# Altium schematic symbol library WR-TBL_Pluggable Connector.SchLib: 879 symbols (part 4 of 15)
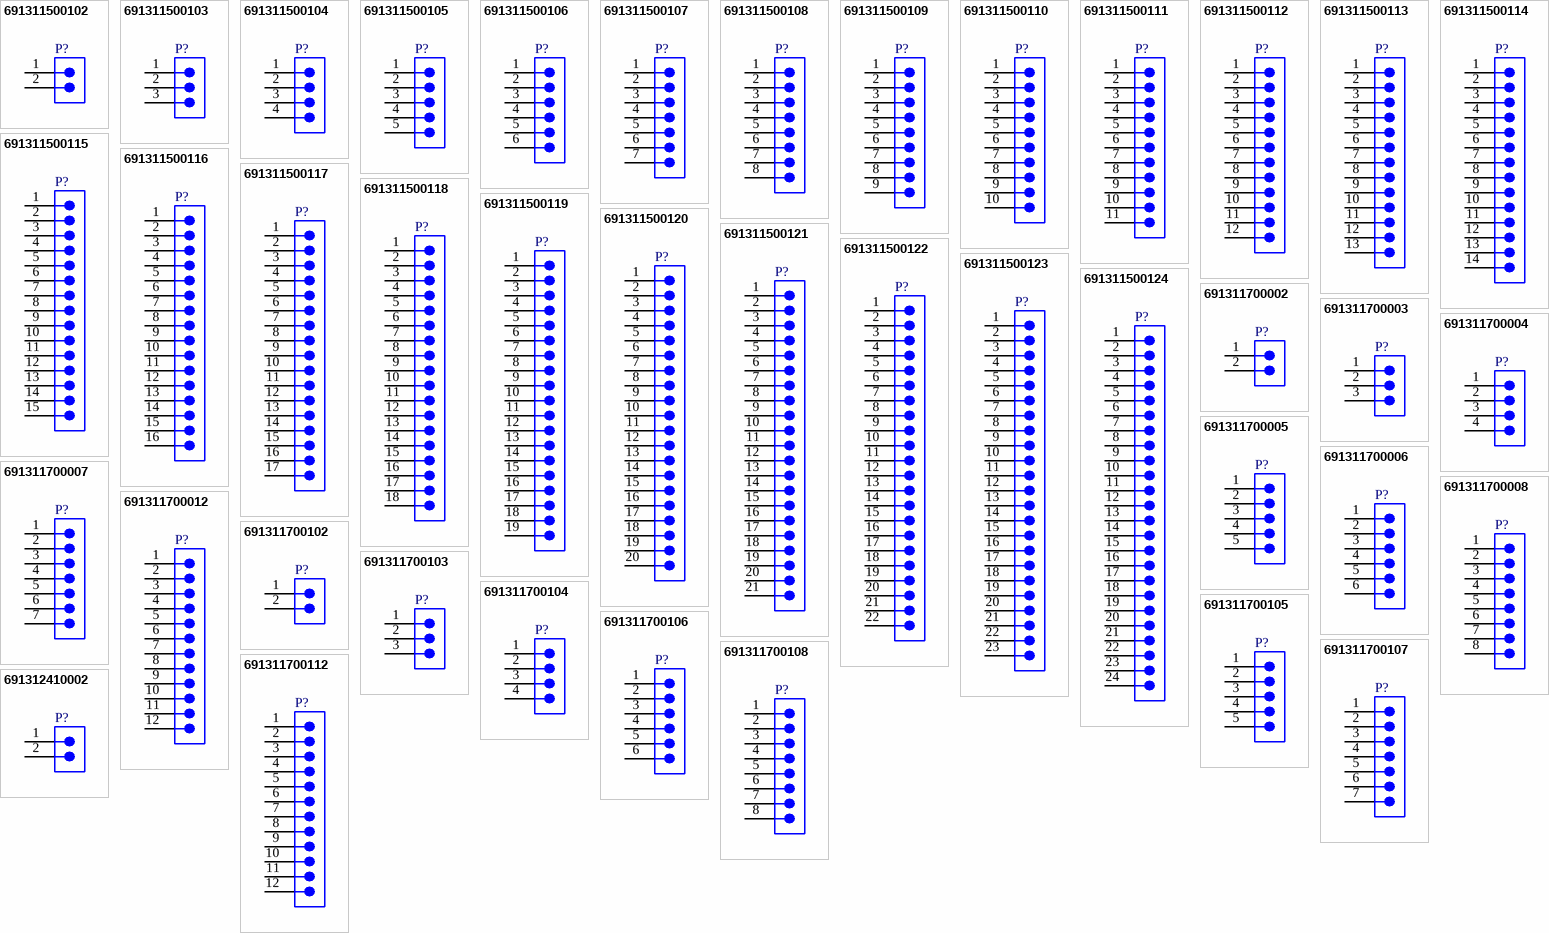
[diagram p24: symbols 691311500102 to 691312410002]

## 691311700103
designator P?  (value not drawn)
WR-TBL Series 3117 Close Vertical PCB Header, THT, pitch 5mm, 03p; Manufacturer: Wurth Elektronik; Modularity: No; Rated Current: 15A; Working Voltage: 300V (AC); Manufacturer Part Number: 691311700103; Product Series: WR-TBL; ComponentLink1Description: Website Link; ComponentLink1URL: https://www.we-online.com; ComponentLink2Description: Datasheet Link; ComponentLink2URL: https://www.we-online.com/components/products/datasheet/691311700103; Mount: Through Hole; Operating Temperature Min: -40degC; Operating Temperature Max: 105degC; Packaging: Box; Application: Pluggable; Number of Pins: 3; Number of Rows: 1; Orientation: Vertical; Lead Pitch: 5mm
footprint 691311700103
pins: 1, 2, 3

## 691311700104
designator P?  (value not drawn)
WR-TBL Series 3117 Close Vertical PCB Header, THT, pitch 5mm, 04p; Manufacturer: Wurth Elektronik; Modularity: No; Rated Current: 15A; Working Voltage: 300V (AC); Manufacturer Part Number: 691311700104; Product Series: WR-TBL; ComponentLink1Description: Website Link; ComponentLink1URL: https://www.we-online.com; ComponentLink2Description: Datasheet Link; ComponentLink2URL: https://www.we-online.com/components/products/datasheet/691311700104; Mount: Through Hole; Operating Temperature Min: -40degC; Operating Temperature Max: 105degC; Packaging: Box; Application: Pluggable; Number of Pins: 4; Number of Rows: 1; Orientation: Vertical; Lead Pitch: 5mm
footprint 691311700104
pins: 1, 2, 3, 4

## 691311700105
designator P?  (value not drawn)
WR-TBL Series 3117 Close Vertical PCB Header, THT, pitch 5mm, 05p; Manufacturer: Wurth Elektronik; Modularity: No; Rated Current: 15A; Working Voltage: 300V (AC); Manufacturer Part Number: 691311700105; Product Series: WR-TBL; ComponentLink1Description: Website Link; ComponentLink1URL: https://www.we-online.com; ComponentLink2Description: Datasheet Link; ComponentLink2URL: https://www.we-online.com/components/products/datasheet/691311700105; Mount: Through Hole; Operating Temperature Min: -40degC; Operating Temperature Max: 105degC; Packaging: Box; Application: Pluggable; Number of Pins: 5; Number of Rows: 1; Orientation: Vertical; Lead Pitch: 5mm
footprint 691311700105
pins: 1, 2, 3, 4, 5

## 691311700106
designator P?  (value not drawn)
WR-TBL Series 3117 Close Vertical PCB Header, THT, pitch 5mm, 06p; Manufacturer: Wurth Elektronik; Modularity: No; Rated Current: 15A; Working Voltage: 300V (AC); Manufacturer Part Number: 691311700106; Product Series: WR-TBL; ComponentLink1Description: Website Link; ComponentLink1URL: https://www.we-online.com; ComponentLink2Description: Datasheet Link; ComponentLink2URL: https://www.we-online.com/components/products/datasheet/691311700106; Mount: Through Hole; Operating Temperature Min: -40degC; Operating Temperature Max: 105degC; Packaging: Box; Application: Pluggable; Number of Pins: 6; Number of Rows: 1; Orientation: Vertical; Lead Pitch: 5mm
footprint 691311700106
pins: 1, 2, 3, 4, 5, 6

## 691311700107
designator P?  (value not drawn)
WR-TBL Series 3117 Close Vertical PCB Header, THT, pitch 5mm, 07p; Manufacturer: Wurth Elektronik; Modularity: No; Rated Current: 15A; Working Voltage: 300V (AC); Manufacturer Part Number: 691311700107; Product Series: WR-TBL; ComponentLink1Description: Website Link; ComponentLink1URL: https://www.we-online.com; ComponentLink2Description: Datasheet Link; ComponentLink2URL: https://www.we-online.com/components/products/datasheet/691311700107; Mount: Through Hole; Operating Temperature Min: -40degC; Operating Temperature Max: 105degC; Packaging: Box; Application: Pluggable; Number of Pins: 7; Number of Rows: 1; Orientation: Vertical; Lead Pitch: 5mm
footprint 691311700107
pins: 1, 2, 3, 4, 5, 6, 7

## 691311700108
designator P?  (value not drawn)
WR-TBL Series 3117 Close Vertical PCB Header, THT, pitch 5mm, 08p; Manufacturer: Wurth Elektronik; Modularity: No; Rated Current: 15A; Working Voltage: 300V (AC); Manufacturer Part Number: 691311700108; Product Series: WR-TBL; ComponentLink1Description: Website Link; ComponentLink1URL: https://www.we-online.com; ComponentLink2Description: Datasheet Link; ComponentLink2URL: https://www.we-online.com/components/products/datasheet/691311700108; Mount: Through Hole; Operating Temperature Min: -40degC; Operating Temperature Max: 105degC; Packaging: Box; Application: Pluggable; Number of Pins: 8; Number of Rows: 1; Orientation: Vertical; Lead Pitch: 5mm
footprint 691311700108
pins: 1, 2, 3, 4, 5, 6, 7, 8

## 691311700112
designator P?  (value not drawn)
WR-TBL Series 3117 Close Vertical PCB Header, THT, pitch 5mm, 12p; Manufacturer: Wurth Elektronik; Modularity: No; Rated Current: 15A; Working Voltage: 300V (AC); Manufacturer Part Number: 691311700112; Product Series: WR-TBL; ComponentLink1Description: Website Link; ComponentLink1URL: https://www.we-online.com; ComponentLink2Description: Datasheet Link; ComponentLink2URL: https://www.we-online.com/components/products/datasheet/691311700112; Mount: Through Hole; Operating Temperature Min: -40degC; Operating Temperature Max: 105degC; Packaging: Box; Application: Pluggable; Number of Pins: 12; Number of Rows: 1; Orientation: Vertical; Lead Pitch: 5mm
footprint 691311700112
pins: 1, 2, 3, 4, 5, 6, 7, 8, 9, 10, 11, 12

## 691312410002
designator P?  (value not drawn)
WR-TBL Series 3124 Open Horizontal PCB Header, THT, pitch 7.62mm, 02p; Manufacturer: Wurth Elektronik; Modularity: No; Rated Current: 20A; Working Voltage: 300V (AC); Manufacturer Part Number: 691312410002; Product Series: WR-TBL; ComponentLink1Description: Website Link; ComponentLink1URL: https://www.we-online.com; ComponentLink2Description: Datasheet Link; ComponentLink2URL: https://www.we-online.com/components/products/datasheet/691312410002; Mount: Through Hole; Operating Temperature Min: -40degC; Operating Temperature Max: 105degC; Packaging: Box; Application: Pluggable; Number of Pins: 2; Number of Rows: 1; Orientation: Horizontal; Lead Pitch: 7.62mm
footprint 691312410002
pins: 1, 2

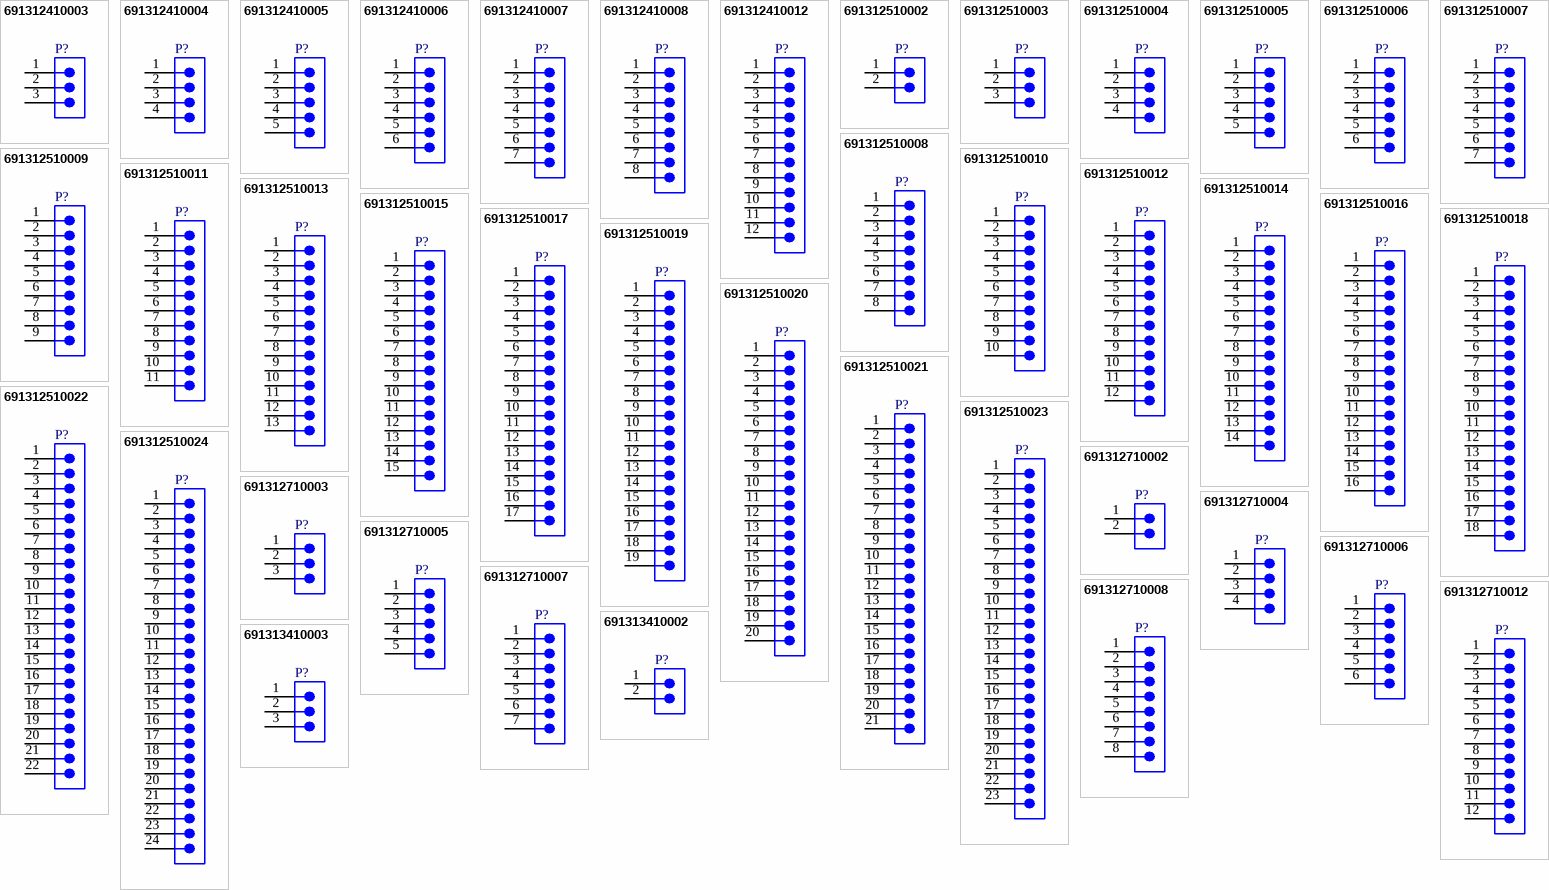
[diagram p5: symbols 691312410003 to 691313410003]

## 691312410003
designator P?  (value not drawn)
WR-TBL Series 3124 Open Horizontal PCB Header, THT, pitch 7.62mm, 03p; Manufacturer: Wurth Elektronik; Modularity: No; Rated Current: 20A; Working Voltage: 300V (AC); Manufacturer Part Number: 691312410003; Product Series: WR-TBL; ComponentLink1Description: Website Link; ComponentLink1URL: https://www.we-online.com; ComponentLink2Description: Datasheet Link; ComponentLink2URL: https://www.we-online.com/components/products/datasheet/691312410003; Mount: Through Hole; Operating Temperature Min: -40degC; Operating Temperature Max: 105degC; Packaging: Box; Application: Pluggable; Number of Pins: 3; Number of Rows: 1; Orientation: Horizontal; Lead Pitch: 7.62mm
footprint 691312410003
pins: 1, 2, 3

## 691312410004
designator P?  (value not drawn)
WR-TBL Series 3124 Open Horizontal PCB Header, THT, pitch 7.62mm, 04p; Manufacturer: Wurth Elektronik; Modularity: No; Rated Current: 20A; Working Voltage: 300V (AC); Manufacturer Part Number: 691312410004; Product Series: WR-TBL; ComponentLink1Description: Website Link; ComponentLink1URL: https://www.we-online.com; ComponentLink2Description: Datasheet Link; ComponentLink2URL: https://www.we-online.com/components/products/datasheet/691312410004; Mount: Through Hole; Operating Temperature Min: -40degC; Operating Temperature Max: 105degC; Packaging: Box; Application: Pluggable; Number of Pins: 4; Number of Rows: 1; Orientation: Horizontal; Lead Pitch: 7.62mm
footprint 691312410004
pins: 1, 2, 3, 4

## 691312410005
designator P?  (value not drawn)
WR-TBL Series 3124 Open Horizontal PCB Header, THT, pitch 7.62mm, 05p; Manufacturer: Wurth Elektronik; Modularity: No; Rated Current: 20A; Working Voltage: 300V (AC); Manufacturer Part Number: 691312410005; Product Series: WR-TBL; ComponentLink1Description: Website Link; ComponentLink1URL: https://www.we-online.com; ComponentLink2Description: Datasheet Link; ComponentLink2URL: https://www.we-online.com/components/products/datasheet/691312410005; Mount: Through Hole; Operating Temperature Min: -40degC; Operating Temperature Max: 105degC; Packaging: Box; Application: Pluggable; Number of Pins: 5; Number of Rows: 1; Orientation: Horizontal; Lead Pitch: 7.62mm
footprint 691312410005
pins: 1, 2, 3, 4, 5

## 691312410006
designator P?  (value not drawn)
WR-TBL Series 3124 Open Horizontal PCB Header, THT, pitch 7.62mm, 06p; Manufacturer: Wurth Elektronik; Modularity: No; Rated Current: 20A; Working Voltage: 300V (AC); Manufacturer Part Number: 691312410006; Product Series: WR-TBL; ComponentLink1Description: Website Link; ComponentLink1URL: https://www.we-online.com; ComponentLink2Description: Datasheet Link; ComponentLink2URL: https://www.we-online.com/components/products/datasheet/691312410006; Mount: Through Hole; Operating Temperature Min: -40degC; Operating Temperature Max: 105degC; Packaging: Box; Application: Pluggable; Number of Pins: 6; Number of Rows: 1; Orientation: Horizontal; Lead Pitch: 7.62mm
footprint 691312410006
pins: 1, 2, 3, 4, 5, 6

## 691312410007
designator P?  (value not drawn)
WR-TBL Series 3124 Open Horizontal PCB Header, THT, pitch 7.62mm, 07p; Manufacturer: Wurth Elektronik; Modularity: No; Rated Current: 20A; Working Voltage: 300V (AC); Manufacturer Part Number: 691312410007; Product Series: WR-TBL; ComponentLink1Description: Website Link; ComponentLink1URL: https://www.we-online.com; ComponentLink2Description: Datasheet Link; ComponentLink2URL: https://www.we-online.com/components/products/datasheet/691312410007; Mount: Through Hole; Operating Temperature Min: -40degC; Operating Temperature Max: 105degC; Packaging: Box; Application: Pluggable; Number of Pins: 7; Number of Rows: 1; Orientation: Horizontal; Lead Pitch: 7.62mm
footprint 691312410007
pins: 1, 2, 3, 4, 5, 6, 7

## 691312410008
designator P?  (value not drawn)
WR-TBL Series 3124 Open Horizontal PCB Header, THT, pitch 7.62mm, 08p; Manufacturer: Wurth Elektronik; Modularity: No; Rated Current: 20A; Working Voltage: 300V (AC); Manufacturer Part Number: 691312410008; Product Series: WR-TBL; ComponentLink1Description: Website Link; ComponentLink1URL: https://www.we-online.com; ComponentLink2Description: Datasheet Link; ComponentLink2URL: https://www.we-online.com/components/products/datasheet/691312410008; Mount: Through Hole; Operating Temperature Min: -40degC; Operating Temperature Max: 105degC; Packaging: Box; Application: Pluggable; Number of Pins: 8; Number of Rows: 1; Orientation: Horizontal; Lead Pitch: 7.62mm
footprint 691312410008
pins: 1, 2, 3, 4, 5, 6, 7, 8

## 691312410012
designator P?  (value not drawn)
WR-TBL Series 3124 Open Horizontal PCB Header, THT, pitch 7.62mm, 12p; Manufacturer: Wurth Elektronik; Modularity: No; Rated Current: 20A; Working Voltage: 300V (AC); Manufacturer Part Number: 691312410012; Product Series: WR-TBL; ComponentLink1Description: Website Link; ComponentLink1URL: https://www.we-online.com; ComponentLink2Description: Datasheet Link; ComponentLink2URL: https://www.we-online.com/components/products/datasheet/691312410012; Mount: Through Hole; Operating Temperature Min: -40degC; Operating Temperature Max: 105degC; Packaging: Box; Application: Pluggable; Number of Pins: 12; Number of Rows: 1; Orientation: Horizontal; Lead Pitch: 7.62mm
footprint 691312410012
pins: 1, 2, 3, 4, 5, 6, 7, 8, 9, 10, 11, 12

## 691312510002
designator P?  (value not drawn)
WR-TBL Series 312 Open Horizontal PCB Header, THT, pitch 5.08mm, 02p; Manufacturer: Wurth Elektronik; Modularity: No; Rated Current: 15A; Working Voltage: 300V (AC); Manufacturer Part Number: 691312510002; Product Series: WR-TBL; ComponentLink1Description: Website Link; ComponentLink1URL: https://www.we-online.com; ComponentLink2Description: Datasheet Link; ComponentLink2URL: https://www.we-online.com/components/products/datasheet/691312510002; Mount: Through Hole; Operating Temperature Min: -40degC; Operating Temperature Max: 105degC; Packaging: Box; Application: Pluggable; Number of Pins: 2; Number of Rows: 1; Orientation: Horizontal; Lead Pitch: 5.08mm
footprint 691312510002
pins: 1, 2

## 691312510003
designator P?  (value not drawn)
WR-TBL Series 312 Open Horizontal PCB Header, THT, pitch 5.08mm, 03p; Manufacturer: Wurth Elektronik; Modularity: No; Rated Current: 15A; Working Voltage: 300V (AC); Manufacturer Part Number: 691312510003; Product Series: WR-TBL; ComponentLink1Description: Website Link; ComponentLink1URL: https://www.we-online.com; ComponentLink2Description: Datasheet Link; ComponentLink2URL: https://www.we-online.com/components/products/datasheet/691312510003; Mount: Through Hole; Operating Temperature Min: -40degC; Operating Temperature Max: 105degC; Packaging: Box; Application: Pluggable; Number of Pins: 3; Number of Rows: 1; Orientation: Horizontal; Lead Pitch: 5.08mm
footprint 691312510003
pins: 1, 2, 3

## 691312510004
designator P?  (value not drawn)
WR-TBL Series 312 Open Horizontal PCB Header, THT, pitch 5.08mm, 04p; Manufacturer: Wurth Elektronik; Modularity: No; Rated Current: 15A; Working Voltage: 300V (AC); Manufacturer Part Number: 691312510004; Product Series: WR-TBL; ComponentLink1Description: Website Link; ComponentLink1URL: https://www.we-online.com; ComponentLink2Description: Datasheet Link; ComponentLink2URL: https://www.we-online.com/components/products/datasheet/691312510004; Mount: Through Hole; Operating Temperature Min: -40degC; Operating Temperature Max: 105degC; Packaging: Box; Application: Pluggable; Number of Pins: 4; Number of Rows: 1; Orientation: Horizontal; Lead Pitch: 5.08mm
footprint 691312510004
pins: 1, 2, 3, 4

## 691312510005
designator P?  (value not drawn)
WR-TBL Series 312 Open Horizontal PCB Header, THT, pitch 5.08mm, 05p; Manufacturer: Wurth Elektronik; Modularity: No; Rated Current: 15A; Working Voltage: 300V (AC); Manufacturer Part Number: 691312510005; Product Series: WR-TBL; ComponentLink1Description: Website Link; ComponentLink1URL: https://www.we-online.com; ComponentLink2Description: Datasheet Link; ComponentLink2URL: https://www.we-online.com/components/products/datasheet/691312510005; Mount: Through Hole; Operating Temperature Min: -40degC; Operating Temperature Max: 105degC; Packaging: Box; Application: Pluggable; Number of Pins: 5; Number of Rows: 1; Orientation: Horizontal; Lead Pitch: 5.08mm
footprint 691312510005
pins: 1, 2, 3, 4, 5

## 691312510006
designator P?  (value not drawn)
WR-TBL Series 312 Open Horizontal PCB Header, THT, pitch 5.08mm, 06p; Manufacturer: Wurth Elektronik; Modularity: No; Rated Current: 15A; Working Voltage: 300V (AC); Manufacturer Part Number: 691312510006; Product Series: WR-TBL; ComponentLink1Description: Website Link; ComponentLink1URL: https://www.we-online.com; ComponentLink2Description: Datasheet Link; ComponentLink2URL: https://www.we-online.com/components/products/datasheet/691312510006; Mount: Through Hole; Operating Temperature Min: -40degC; Operating Temperature Max: 105degC; Packaging: Box; Application: Pluggable; Number of Pins: 6; Number of Rows: 1; Orientation: Horizontal; Lead Pitch: 5.08mm
footprint 691312510006
pins: 1, 2, 3, 4, 5, 6

## 691312510007
designator P?  (value not drawn)
WR-TBL Series 312 Open Horizontal PCB Header, THT, pitch 5.08mm, 07p; Manufacturer: Wurth Elektronik; Modularity: No; Rated Current: 15A; Working Voltage: 300V (AC); Manufacturer Part Number: 691312510007; Product Series: WR-TBL; ComponentLink1Description: Website Link; ComponentLink1URL: https://www.we-online.com; ComponentLink2Description: Datasheet Link; ComponentLink2URL: https://www.we-online.com/components/products/datasheet/691312510007; Mount: Through Hole; Operating Temperature Min: -40degC; Operating Temperature Max: 105degC; Packaging: Box; Application: Pluggable; Number of Pins: 7; Number of Rows: 1; Orientation: Horizontal; Lead Pitch: 5.08mm
footprint 691312510007
pins: 1, 2, 3, 4, 5, 6, 7

## 691312510008
designator P?  (value not drawn)
WR-TBL Series 312 Open Horizontal PCB Header, THT, pitch 5.08mm, 08p; Manufacturer: Wurth Elektronik; Modularity: No; Rated Current: 15A; Working Voltage: 300V (AC); Manufacturer Part Number: 691312510008; Product Series: WR-TBL; ComponentLink1Description: Website Link; ComponentLink1URL: https://www.we-online.com; ComponentLink2Description: Datasheet Link; ComponentLink2URL: https://www.we-online.com/components/products/datasheet/691312510008; Mount: Through Hole; Operating Temperature Min: -40degC; Operating Temperature Max: 105degC; Packaging: Box; Application: Pluggable; Number of Pins: 8; Number of Rows: 1; Orientation: Horizontal; Lead Pitch: 5.08mm
footprint 691312510008
pins: 1, 2, 3, 4, 5, 6, 7, 8

## 691312510009
designator P?  (value not drawn)
WR-TBL Series 312 Open Horizontal PCB Header, THT, pitch 5.08mm, 09p; Manufacturer: Wurth Elektronik; Modularity: No; Rated Current: 15A; Working Voltage: 300V (AC); Manufacturer Part Number: 691312510009; Product Series: WR-TBL; ComponentLink1Description: Website Link; ComponentLink1URL: https://www.we-online.com; ComponentLink2Description: Datasheet Link; ComponentLink2URL: https://www.we-online.com/components/products/datasheet/691312510009; Mount: Through Hole; Operating Temperature Min: -40degC; Operating Temperature Max: 105degC; Packaging: Box; Application: Pluggable; Number of Pins: 9; Number of Rows: 1; Orientation: Horizontal; Lead Pitch: 5.08mm
footprint 691312510009
pins: 1, 2, 3, 4, 5, 6, 7, 8, 9

## 691312510010
designator P?  (value not drawn)
WR-TBL Series 312 Open Horizontal PCB Header, THT, pitch 5.08mm, 10p; Manufacturer: Wurth Elektronik; Modularity: No; Rated Current: 15A; Working Voltage: 300V (AC); Manufacturer Part Number: 691312510010; Product Series: WR-TBL; ComponentLink1Description: Website Link; ComponentLink1URL: https://www.we-online.com; ComponentLink2Description: Datasheet Link; ComponentLink2URL: https://www.we-online.com/components/products/datasheet/691312510010; Mount: Through Hole; Operating Temperature Min: -40degC; Operating Temperature Max: 105degC; Packaging: Box; Application: Pluggable; Number of Pins: 10; Number of Rows: 1; Orientation: Horizontal; Lead Pitch: 5.08mm
footprint 691312510010
pins: 1, 2, 3, 4, 5, 6, 7, 8, 9, 10

## 691312510011
designator P?  (value not drawn)
WR-TBL Series 312 Open Horizontal PCB Header, THT, pitch 5.08mm, 11p; Manufacturer: Wurth Elektronik; Modularity: No; Rated Current: 15A; Working Voltage: 300V (AC); Manufacturer Part Number: 691312510011; Product Series: WR-TBL; ComponentLink1Description: Website Link; ComponentLink1URL: https://www.we-online.com; ComponentLink2Description: Datasheet Link; ComponentLink2URL: https://www.we-online.com/components/products/datasheet/691312510011; Mount: Through Hole; Operating Temperature Min: -40degC; Operating Temperature Max: 105degC; Packaging: Box; Application: Pluggable; Number of Pins: 11; Number of Rows: 1; Orientation: Horizontal; Lead Pitch: 5.08mm
footprint 691312510011
pins: 1, 2, 3, 4, 5, 6, 7, 8, 9, 10, 11

## 691312510012
designator P?  (value not drawn)
WR-TBL Series 312 Open Horizontal PCB Header, THT, pitch 5.08mm, 12p; Manufacturer: Wurth Elektronik; Modularity: No; Rated Current: 15A; Working Voltage: 300V (AC); Manufacturer Part Number: 691312510012; Product Series: WR-TBL; ComponentLink1Description: Website Link; ComponentLink1URL: https://www.we-online.com; ComponentLink2Description: Datasheet Link; ComponentLink2URL: https://www.we-online.com/components/products/datasheet/691312510012; Mount: Through Hole; Operating Temperature Min: -40degC; Operating Temperature Max: 105degC; Packaging: Box; Application: Pluggable; Number of Pins: 12; Number of Rows: 1; Orientation: Horizontal; Lead Pitch: 5.08mm
footprint 691312510012
pins: 1, 2, 3, 4, 5, 6, 7, 8, 9, 10, 11, 12

## 691312510013
designator P?  (value not drawn)
WR-TBL Series 312 Open Horizontal PCB Header, THT, pitch 5.08mm, 13p; Manufacturer: Wurth Elektronik; Modularity: No; Rated Current: 15A; Working Voltage: 300V (AC); Manufacturer Part Number: 691312510013; Product Series: WR-TBL; ComponentLink1Description: Website Link; ComponentLink1URL: https://www.we-online.com; ComponentLink2Description: Datasheet Link; ComponentLink2URL: https://www.we-online.com/components/products/datasheet/691312510013; Mount: Through Hole; Operating Temperature Min: -40degC; Operating Temperature Max: 105degC; Packaging: Box; Application: Pluggable; Number of Pins: 13; Number of Rows: 1; Orientation: Horizontal; Lead Pitch: 5.08mm
footprint 691312510013
pins: 1, 2, 3, 4, 5, 6, 7, 8, 9, 10, 11, 12, 13

## 691312510014
designator P?  (value not drawn)
WR-TBL Series 312 Open Horizontal PCB Header, THT, pitch 5.08mm, 14p; Manufacturer: Wurth Elektronik; Modularity: No; Rated Current: 15A; Working Voltage: 300V (AC); Manufacturer Part Number: 691312510014; Product Series: WR-TBL; ComponentLink1Description: Website Link; ComponentLink1URL: https://www.we-online.com; ComponentLink2Description: Datasheet Link; ComponentLink2URL: https://www.we-online.com/components/products/datasheet/691312510014; Mount: Through Hole; Operating Temperature Min: -40degC; Operating Temperature Max: 105degC; Packaging: Box; Application: Pluggable; Number of Pins: 14; Number of Rows: 1; Orientation: Horizontal; Lead Pitch: 5.08mm
footprint 691312510014
pins: 1, 2, 3, 4, 5, 6, 7, 8, 9, 10, 11, 12, 13, 14

## 691312510015
designator P?  (value not drawn)
WR-TBL Series 312 Open Horizontal PCB Header, THT, pitch 5.08mm, 15p; Manufacturer: Wurth Elektronik; Modularity: No; Rated Current: 15A; Working Voltage: 300V (AC); Manufacturer Part Number: 691312510015; Product Series: WR-TBL; ComponentLink1Description: Website Link; ComponentLink1URL: https://www.we-online.com; ComponentLink2Description: Datasheet Link; ComponentLink2URL: https://www.we-online.com/components/products/datasheet/691312510015; Mount: Through Hole; Operating Temperature Min: -40degC; Operating Temperature Max: 105degC; Packaging: Box; Application: Pluggable; Number of Pins: 15; Number of Rows: 1; Orientation: Horizontal; Lead Pitch: 5.08mm
footprint 691312510015
pins: 1, 2, 3, 4, 5, 6, 7, 8, 9, 10, 11, 12, 13, 14, 15

## 691312510016
designator P?  (value not drawn)
WR-TBL Series 312 Open Horizontal PCB Header, THT, pitch 5.08mm, 16p; Manufacturer: Wurth Elektronik; Modularity: No; Rated Current: 15A; Working Voltage: 300V (AC); Manufacturer Part Number: 691312510016; Product Series: WR-TBL; ComponentLink1Description: Website Link; ComponentLink1URL: https://www.we-online.com; ComponentLink2Description: Datasheet Link; ComponentLink2URL: https://www.we-online.com/components/products/datasheet/691312510016; Mount: Through Hole; Operating Temperature Min: -40degC; Operating Temperature Max: 105degC; Packaging: Box; Application: Pluggable; Number of Pins: 16; Number of Rows: 1; Orientation: Horizontal; Lead Pitch: 5.08mm
footprint 691312510016
pins: 1, 2, 3, 4, 5, 6, 7, 8, 9, 10, 11, 12, 13, 14, 15, 16

## 691312510017
designator P?  (value not drawn)
WR-TBL Series 312 Open Horizontal PCB Header, THT, pitch 5.08mm, 17p; Manufacturer: Wurth Elektronik; Modularity: No; Rated Current: 15A; Working Voltage: 300V (AC); Manufacturer Part Number: 691312510017; Product Series: WR-TBL; ComponentLink1Description: Website Link; ComponentLink1URL: https://www.we-online.com; ComponentLink2Description: Datasheet Link; ComponentLink2URL: https://www.we-online.com/components/products/datasheet/691312510017; Mount: Through Hole; Operating Temperature Min: -40degC; Operating Temperature Max: 105degC; Packaging: Box; Application: Pluggable; Number of Pins: 17; Number of Rows: 1; Orientation: Horizontal; Lead Pitch: 5.08mm
footprint 691312510017
pins: 1, 2, 3, 4, 5, 6, 7, 8, 9, 10, 11, 12, 13, 14, 15, 16, 17

## 691312510018
designator P?  (value not drawn)
WR-TBL Series 312 Open Horizontal PCB Header, THT, pitch 5.08mm, 18p; Manufacturer: Wurth Elektronik; Modularity: No; Rated Current: 15A; Working Voltage: 300V (AC); Manufacturer Part Number: 691312510018; Product Series: WR-TBL; ComponentLink1Description: Website Link; ComponentLink1URL: https://www.we-online.com; ComponentLink2Description: Datasheet Link; ComponentLink2URL: https://www.we-online.com/components/products/datasheet/691312510018; Mount: Through Hole; Operating Temperature Min: -40degC; Operating Temperature Max: 105degC; Packaging: Box; Application: Pluggable; Number of Pins: 18; Number of Rows: 1; Orientation: Horizontal; Lead Pitch: 5.08mm
footprint 691312510018
pins: 1, 2, 3, 4, 5, 6, 7, 8, 9, 10, 11, 12, 13, 14, 15, 16, 17, 18

## 691312510019
designator P?  (value not drawn)
WR-TBL Series 312 Open Horizontal PCB Header, THT, pitch 5.08mm, 19p; Manufacturer: Wurth Elektronik; Modularity: No; Rated Current: 15A; Working Voltage: 300V (AC); Manufacturer Part Number: 691312510019; Product Series: WR-TBL; ComponentLink1Description: Website Link; ComponentLink1URL: https://www.we-online.com; ComponentLink2Description: Datasheet Link; ComponentLink2URL: https://www.we-online.com/components/products/datasheet/691312510019; Mount: Through Hole; Operating Temperature Min: -40degC; Operating Temperature Max: 105degC; Packaging: Box; Application: Pluggable; Number of Pins: 19; Number of Rows: 1; Orientation: Horizontal; Lead Pitch: 5.08mm
footprint 691312510019
pins: 1, 2, 3, 4, 5, 6, 7, 8, 9, 10, 11, 12, 13, 14, 15, 16, 17, 18, 19

## 691312510020
designator P?  (value not drawn)
WR-TBL Series 312 Open Horizontal PCB Header, THT, pitch 5.08mm, 20p; Manufacturer: Wurth Elektronik; Modularity: No; Rated Current: 15A; Working Voltage: 300V (AC); Manufacturer Part Number: 691312510020; Product Series: WR-TBL; ComponentLink1Description: Website Link; ComponentLink1URL: https://www.we-online.com; ComponentLink2Description: Datasheet Link; ComponentLink2URL: https://www.we-online.com/components/products/datasheet/691312510020; Mount: Through Hole; Operating Temperature Min: -40degC; Operating Temperature Max: 105degC; Packaging: Box; Application: Pluggable; Number of Pins: 20; Number of Rows: 1; Orientation: Horizontal; Lead Pitch: 5.08mm
footprint 691312510020
pins: 1, 2, 3, 4, 5, 6, 7, 8, 9, 10, 11, 12, 13, 14, 15, 16, 17, 18, 19, 20

## 691312510021
designator P?  (value not drawn)
WR-TBL Series 312 Open Horizontal PCB Header, THT, pitch 5.08mm, 21p; Manufacturer: Wurth Elektronik; Modularity: No; Rated Current: 15A; Working Voltage: 300V (AC); Manufacturer Part Number: 691312510021; Product Series: WR-TBL; ComponentLink1Description: Website Link; ComponentLink1URL: https://www.we-online.com; ComponentLink2Description: Datasheet Link; ComponentLink2URL: https://www.we-online.com/components/products/datasheet/691312510021; Mount: Through Hole; Operating Temperature Min: -40degC; Operating Temperature Max: 105degC; Packaging: Box; Application: Pluggable; Number of Pins: 21; Number of Rows: 1; Orientation: Horizontal; Lead Pitch: 5.08mm
footprint 691312510021
pins: 1, 2, 3, 4, 5, 6, 7, 8, 9, 10, 11, 12, 13, 14, 15, 16, 17, 18, 19, 20, 21

## 691312510022
designator P?  (value not drawn)
WR-TBL Series 312 Open Horizontal PCB Header, THT, pitch 5.08mm, 22p; Manufacturer: Wurth Elektronik; Modularity: No; Rated Current: 15A; Working Voltage: 300V (AC); Manufacturer Part Number: 691312510022; Product Series: WR-TBL; ComponentLink1Description: Website Link; ComponentLink1URL: https://www.we-online.com; ComponentLink2Description: Datasheet Link; ComponentLink2URL: https://www.we-online.com/components/products/datasheet/691312510022; Mount: Through Hole; Operating Temperature Min: -40degC; Operating Temperature Max: 105degC; Packaging: Box; Application: Pluggable; Number of Pins: 22; Number of Rows: 1; Orientation: Horizontal; Lead Pitch: 5.08mm
footprint 691312510022
pins: 1, 2, 3, 4, 5, 6, 7, 8, 9, 10, 11, 12, 13, 14, 15, 16, 17, 18, 19, 20, 21, 22

## 691312510023
designator P?  (value not drawn)
WR-TBL Series 312 Open Horizontal PCB Header, THT, pitch 5.08mm, 23p; Manufacturer: Wurth Elektronik; Modularity: No; Rated Current: 15A; Working Voltage: 300V (AC); Manufacturer Part Number: 691312510023; Product Series: WR-TBL; ComponentLink1Description: Website Link; ComponentLink1URL: https://www.we-online.com; ComponentLink2Description: Datasheet Link; ComponentLink2URL: https://www.we-online.com/components/products/datasheet/691312510023; Mount: Through Hole; Operating Temperature Min: -40degC; Operating Temperature Max: 105degC; Packaging: Box; Application: Pluggable; Number of Pins: 23; Number of Rows: 1; Orientation: Horizontal; Lead Pitch: 5.08mm
footprint 691312510023
pins: 1, 2, 3, 4, 5, 6, 7, 8, 9, 10, 11, 12, 13, 14, 15, 16, 17, 18, 19, 20, 21, 22, 23

## 691312510024
designator P?  (value not drawn)
WR-TBL Series 312 Open Horizontal PCB Header, THT, pitch 5.08mm, 24p; Manufacturer: Wurth Elektronik; Modularity: No; Rated Current: 15A; Working Voltage: 300V (AC); Manufacturer Part Number: 691312510024; Product Series: WR-TBL; ComponentLink1Description: Website Link; ComponentLink1URL: https://www.we-online.com; ComponentLink2Description: Datasheet Link; ComponentLink2URL: https://www.we-online.com/components/products/datasheet/691312510024; Mount: Through Hole; Operating Temperature Min: -40degC; Operating Temperature Max: 105degC; Packaging: Box; Application: Pluggable; Number of Pins: 24; Number of Rows: 1; Orientation: Horizontal; Lead Pitch: 5.08mm
footprint 691312510024
pins: 1, 2, 3, 4, 5, 6, 7, 8, 9, 10, 11, 12, 13, 14, 15, 16, 17, 18, 19, 20, 21, 22, 23, 24

## 691312710002
designator P?  (value not drawn)
WR-TBL Series 3127 Open Horizontal PCB Header, THT, pitch 5mm, 02p; Manufacturer: Wurth Elektronik; Modularity: No; Rated Current: 15A; Working Voltage: 300V (AC); Manufacturer Part Number: 691312710002; Product Series: WR-TBL; ComponentLink1Description: Website Link; ComponentLink1URL: https://www.we-online.com; ComponentLink2Description: Datasheet Link; ComponentLink2URL: https://www.we-online.com/components/products/datasheet/691312710002; Mount: Through Hole; Operating Temperature Min: -40degC; Operating Temperature Max: 105degC; Packaging: Box; Application: Pluggable; Number of Pins: 2; Number of Rows: 1; Orientation: Horizontal; Lead Pitch: 5mm
footprint 691312710002
pins: 1, 2

## 691312710003
designator P?  (value not drawn)
WR-TBL Series 3127 Open Horizontal PCB Header, THT, pitch 5mm, 03p; Manufacturer: Wurth Elektronik; Modularity: No; Rated Current: 15A; Working Voltage: 300V (AC); Manufacturer Part Number: 691312710003; Product Series: WR-TBL; ComponentLink1Description: Website Link; ComponentLink1URL: https://www.we-online.com; ComponentLink2Description: Datasheet Link; ComponentLink2URL: https://www.we-online.com/components/products/datasheet/691312710003; Mount: Through Hole; Operating Temperature Min: -40degC; Operating Temperature Max: 105degC; Packaging: Box; Application: Pluggable; Number of Pins: 3; Number of Rows: 1; Orientation: Horizontal; Lead Pitch: 5mm
footprint 691312710003
pins: 1, 2, 3

## 691312710004
designator P?  (value not drawn)
WR-TBL Series 3127 Open Horizontal PCB Header, THT, pitch 5mm, 04p; Manufacturer: Wurth Elektronik; Modularity: No; Rated Current: 15A; Working Voltage: 300V (AC); Manufacturer Part Number: 691312710004; Product Series: WR-TBL; ComponentLink1Description: Website Link; ComponentLink1URL: https://www.we-online.com; ComponentLink2Description: Datasheet Link; ComponentLink2URL: https://www.we-online.com/components/products/datasheet/691312710004; Mount: Through Hole; Operating Temperature Min: -40degC; Operating Temperature Max: 105degC; Packaging: Box; Application: Pluggable; Number of Pins: 4; Number of Rows: 1; Orientation: Horizontal; Lead Pitch: 5mm
footprint 691312710004
pins: 1, 2, 3, 4

## 691312710005
designator P?  (value not drawn)
WR-TBL Series 3127 Open Horizontal PCB Header, THT, pitch 5mm, 05p; Manufacturer: Wurth Elektronik; Modularity: No; Rated Current: 15A; Working Voltage: 300V (AC); Manufacturer Part Number: 691312710005; Product Series: WR-TBL; ComponentLink1Description: Website Link; ComponentLink1URL: https://www.we-online.com; ComponentLink2Description: Datasheet Link; ComponentLink2URL: https://www.we-online.com/components/products/datasheet/691312710005; Mount: Through Hole; Operating Temperature Min: -40degC; Operating Temperature Max: 105degC; Packaging: Box; Application: Pluggable; Number of Pins: 5; Number of Rows: 1; Orientation: Horizontal; Lead Pitch: 5mm
footprint 691312710005
pins: 1, 2, 3, 4, 5

## 691312710006
designator P?  (value not drawn)
WR-TBL Series 3127 Open Horizontal PCB Header, THT, pitch 5mm, 06p; Manufacturer: Wurth Elektronik; Modularity: No; Rated Current: 15A; Working Voltage: 300V (AC); Manufacturer Part Number: 691312710006; Product Series: WR-TBL; ComponentLink1Description: Website Link; ComponentLink1URL: https://www.we-online.com; ComponentLink2Description: Datasheet Link; ComponentLink2URL: https://www.we-online.com/components/products/datasheet/691312710006; Mount: Through Hole; Operating Temperature Min: -40degC; Operating Temperature Max: 105degC; Packaging: Box; Application: Pluggable; Number of Pins: 6; Number of Rows: 1; Orientation: Horizontal; Lead Pitch: 5mm
footprint 691312710006
pins: 1, 2, 3, 4, 5, 6

## 691312710007
designator P?  (value not drawn)
WR-TBL Series 3127 Open Horizontal PCB Header, THT, pitch 5mm, 07p; Manufacturer: Wurth Elektronik; Modularity: No; Rated Current: 15A; Working Voltage: 300V (AC); Manufacturer Part Number: 691312710007; Product Series: WR-TBL; ComponentLink1Description: Website Link; ComponentLink1URL: https://www.we-online.com; ComponentLink2Description: Datasheet Link; ComponentLink2URL: https://www.we-online.com/components/products/datasheet/691312710007; Mount: Through Hole; Operating Temperature Min: -40degC; Operating Temperature Max: 105degC; Packaging: Box; Application: Pluggable; Number of Pins: 7; Number of Rows: 1; Orientation: Horizontal; Lead Pitch: 5mm
footprint 691312710007
pins: 1, 2, 3, 4, 5, 6, 7

## 691312710008
designator P?  (value not drawn)
WR-TBL Series 3127 Open Horizontal PCB Header, THT, pitch 5mm, 08p; Manufacturer: Wurth Elektronik; Modularity: No; Rated Current: 15A; Working Voltage: 300V (AC); Manufacturer Part Number: 691312710008; Product Series: WR-TBL; ComponentLink1Description: Website Link; ComponentLink1URL: https://www.we-online.com; ComponentLink2Description: Datasheet Link; ComponentLink2URL: https://www.we-online.com/components/products/datasheet/691312710008; Mount: Through Hole; Operating Temperature Min: -40degC; Operating Temperature Max: 105degC; Packaging: Box; Application: Pluggable; Number of Pins: 8; Number of Rows: 1; Orientation: Horizontal; Lead Pitch: 5mm
footprint 691312710008
pins: 1, 2, 3, 4, 5, 6, 7, 8

## 691312710012
designator P?  (value not drawn)
WR-TBL Series 3127 Open Horizontal PCB Header, THT, pitch 5mm, 12p; Manufacturer: Wurth Elektronik; Modularity: No; Rated Current: 15A; Working Voltage: 300V (AC); Manufacturer Part Number: 691312710012; Product Series: WR-TBL; ComponentLink1Description: Website Link; ComponentLink1URL: https://www.we-online.com; ComponentLink2Description: Datasheet Link; ComponentLink2URL: https://www.we-online.com/components/products/datasheet/691312710012; Mount: Through Hole; Operating Temperature Min: -40degC; Operating Temperature Max: 105degC; Packaging: Box; Application: Pluggable; Number of Pins: 12; Number of Rows: 1; Orientation: Horizontal; Lead Pitch: 5mm
footprint 691312710012
pins: 1, 2, 3, 4, 5, 6, 7, 8, 9, 10, 11, 12

## 691313410002
designator P?  (value not drawn)
WR-TBL Series 3134 Close Horizontal PCB Header, THT, pitch 7.62mm, 02p; Manufacturer: Wurth Elektronik; Modularity: No; Rated Current: 20A; Working Voltage: 300V (AC); Manufacturer Part Number: 691313410002; Product Series: WR-TBL; ComponentLink1Description: Website Link; ComponentLink1URL: https://www.we-online.com; ComponentLink2Description: Datasheet Link; ComponentLink2URL: https://www.we-online.com/components/products/datasheet/691313410002; Mount: Through Hole; Operating Temperature Min: -40degC; Operating Temperature Max: 105degC; Packaging: Box; Application: Pluggable; Number of Pins: 2; Number of Rows: 1; Orientation: Horizontal; Lead Pitch: 7.62mm
footprint 691313410002
pins: 1, 2

## 691313410003
designator P?  (value not drawn)
WR-TBL Series 3134 Close Horizontal PCB Header, THT, pitch 7.62mm, 03p; Manufacturer: Wurth Elektronik; Modularity: No; Rated Current: 20A; Working Voltage: 300V (AC); Manufacturer Part Number: 691313410003; Product Series: WR-TBL; ComponentLink1Description: Website Link; ComponentLink1URL: https://www.we-online.com; ComponentLink2Description: Datasheet Link; ComponentLink2URL: https://www.we-online.com/components/products/datasheet/691313410003; Mount: Through Hole; Operating Temperature Min: -40degC; Operating Temperature Max: 105degC; Packaging: Box; Application: Pluggable; Number of Pins: 3; Number of Rows: 1; Orientation: Horizontal; Lead Pitch: 7.62mm
footprint 691313410003
pins: 1, 2, 3

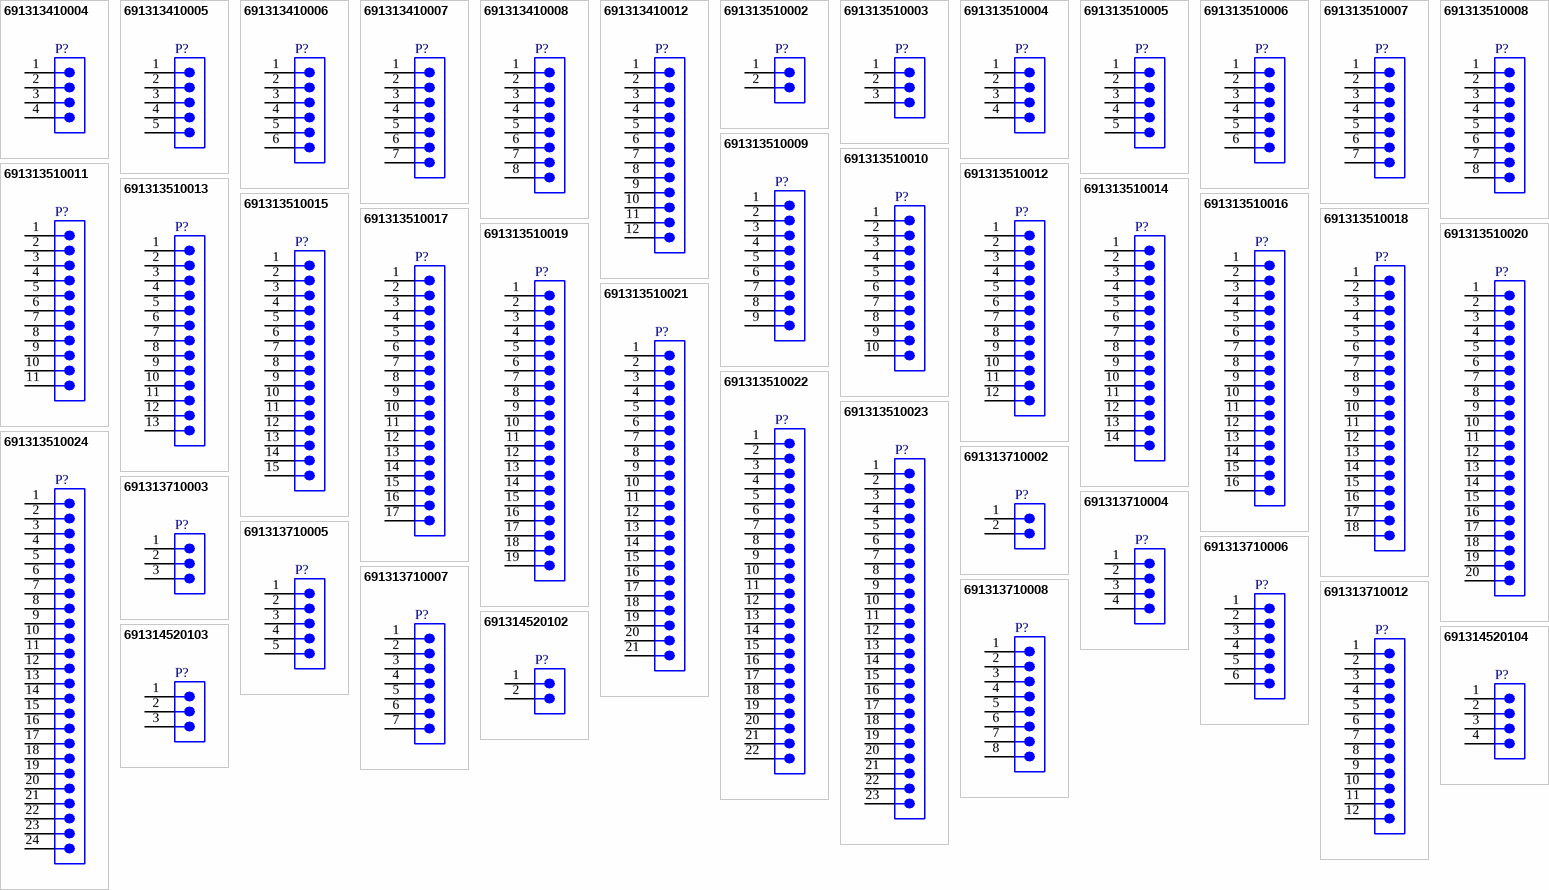
[diagram p6: symbols 691313410004 to 691314520104]

## 691313410004
designator P?  (value not drawn)
WR-TBL Series 3134 Close Horizontal PCB Header, THT, pitch 7.62mm, 04p; Manufacturer: Wurth Elektronik; Modularity: No; Rated Current: 20A; Working Voltage: 300V (AC); Manufacturer Part Number: 691313410004; Product Series: WR-TBL; ComponentLink1Description: Website Link; ComponentLink1URL: https://www.we-online.com; ComponentLink2Description: Datasheet Link; ComponentLink2URL: https://www.we-online.com/components/products/datasheet/691313410004; Mount: Through Hole; Operating Temperature Min: -40degC; Operating Temperature Max: 105degC; Packaging: Box; Application: Pluggable; Number of Pins: 4; Number of Rows: 1; Orientation: Horizontal; Lead Pitch: 7.62mm
footprint 691313410004
pins: 1, 2, 3, 4

## 691313410005
designator P?  (value not drawn)
WR-TBL Series 3134 Close Horizontal PCB Header, THT, pitch 7.62mm, 05p; Manufacturer: Wurth Elektronik; Modularity: No; Rated Current: 20A; Working Voltage: 300V (AC); Manufacturer Part Number: 691313410005; Product Series: WR-TBL; ComponentLink1Description: Website Link; ComponentLink1URL: https://www.we-online.com; ComponentLink2Description: Datasheet Link; ComponentLink2URL: https://www.we-online.com/components/products/datasheet/691313410005; Mount: Through Hole; Operating Temperature Min: -40degC; Operating Temperature Max: 105degC; Packaging: Box; Application: Pluggable; Number of Pins: 5; Number of Rows: 1; Orientation: Horizontal; Lead Pitch: 7.62mm
footprint 691313410005
pins: 1, 2, 3, 4, 5

## 691313410006
designator P?  (value not drawn)
WR-TBL Series 3134 Close Horizontal PCB Header, THT, pitch 7.62mm, 06p; Manufacturer: Wurth Elektronik; Modularity: No; Rated Current: 20A; Working Voltage: 300V (AC); Manufacturer Part Number: 691313410006; Product Series: WR-TBL; ComponentLink1Description: Website Link; ComponentLink1URL: https://www.we-online.com; ComponentLink2Description: Datasheet Link; ComponentLink2URL: https://www.we-online.com/components/products/datasheet/691313410006; Mount: Through Hole; Operating Temperature Min: -40degC; Operating Temperature Max: 105degC; Packaging: Box; Application: Pluggable; Number of Pins: 6; Number of Rows: 1; Orientation: Horizontal; Lead Pitch: 7.62mm
footprint 691313410006
pins: 1, 2, 3, 4, 5, 6

## 691313410007
designator P?  (value not drawn)
WR-TBL Series 3134 Close Horizontal PCB Header, THT, pitch 7.62mm, 07p; Manufacturer: Wurth Elektronik; Modularity: No; Rated Current: 20A; Working Voltage: 300V (AC); Manufacturer Part Number: 691313410007; Product Series: WR-TBL; ComponentLink1Description: Website Link; ComponentLink1URL: https://www.we-online.com; ComponentLink2Description: Datasheet Link; ComponentLink2URL: https://www.we-online.com/components/products/datasheet/691313410007; Mount: Through Hole; Operating Temperature Min: -40degC; Operating Temperature Max: 105degC; Packaging: Box; Application: Pluggable; Number of Pins: 7; Number of Rows: 1; Orientation: Horizontal; Lead Pitch: 7.62mm
footprint 691313410007
pins: 1, 2, 3, 4, 5, 6, 7

## 691313410008
designator P?  (value not drawn)
WR-TBL Series 3134 Close Horizontal PCB Header, THT, pitch 7.62mm, 08p; Manufacturer: Wurth Elektronik; Modularity: No; Rated Current: 20A; Working Voltage: 300V (AC); Manufacturer Part Number: 691313410008; Product Series: WR-TBL; ComponentLink1Description: Website Link; ComponentLink1URL: https://www.we-online.com; ComponentLink2Description: Datasheet Link; ComponentLink2URL: https://www.we-online.com/components/products/datasheet/691313410008; Mount: Through Hole; Operating Temperature Min: -40degC; Operating Temperature Max: 105degC; Packaging: Box; Application: Pluggable; Number of Pins: 8; Number of Rows: 1; Orientation: Horizontal; Lead Pitch: 7.62mm
footprint 691313410008
pins: 1, 2, 3, 4, 5, 6, 7, 8

## 691313410012
designator P?  (value not drawn)
WR-TBL Series 3134 Close Horizontal PCB Header, THT, pitch 7.62mm, 12p; Manufacturer: Wurth Elektronik; Modularity: No; Rated Current: 20A; Working Voltage: 300V (AC); Manufacturer Part Number: 691313410012; Product Series: WR-TBL; ComponentLink1Description: Website Link; ComponentLink1URL: https://www.we-online.com; ComponentLink2Description: Datasheet Link; ComponentLink2URL: https://www.we-online.com/components/products/datasheet/691313410012; Mount: Through Hole; Operating Temperature Min: -40degC; Operating Temperature Max: 105degC; Packaging: Box; Application: Pluggable; Number of Pins: 12; Number of Rows: 1; Orientation: Horizontal; Lead Pitch: 7.62mm
footprint 691313410012
pins: 1, 2, 3, 4, 5, 6, 7, 8, 9, 10, 11, 12

## 691313510002
designator P?  (value not drawn)
WR-TBL Series 313 Close Horizontal PCB Header, THT, pitch 5.08mm, 02p; Manufacturer: Wurth Elektronik; Modularity: No; Rated Current: 15A; Working Voltage: 300V (AC); Manufacturer Part Number: 691313510002; Product Series: WR-TBL; ComponentLink1Description: Website Link; ComponentLink1URL: https://www.we-online.com; ComponentLink2Description: Datasheet Link; ComponentLink2URL: https://www.we-online.com/components/products/datasheet/691313510002; Mount: Through Hole; Operating Temperature Min: -40degC; Operating Temperature Max: 105degC; Packaging: Box; Application: Pluggable; Number of Pins: 2; Number of Rows: 1; Orientation: Horizontal; Lead Pitch: 5.08mm
footprint 691313510002
pins: 1, 2

## 691313510003
designator P?  (value not drawn)
WR-TBL Series 313 Close Horizontal PCB Header, THT, pitch 5.08mm, 03p; Manufacturer: Wurth Elektronik; Modularity: No; Rated Current: 15A; Working Voltage: 300V (AC); Manufacturer Part Number: 691313510003; Product Series: WR-TBL; ComponentLink1Description: Website Link; ComponentLink1URL: https://www.we-online.com; ComponentLink2Description: Datasheet Link; ComponentLink2URL: https://www.we-online.com/components/products/datasheet/691313510003; Mount: Through Hole; Operating Temperature Min: -40degC; Operating Temperature Max: 105degC; Packaging: Box; Application: Pluggable; Number of Pins: 3; Number of Rows: 1; Orientation: Horizontal; Lead Pitch: 5.08mm
footprint 691313510003
pins: 1, 2, 3

## 691313510004
designator P?  (value not drawn)
WR-TBL Series 313 Close Horizontal PCB Header, THT, pitch 5.08mm, 04p; Manufacturer: Wurth Elektronik; Modularity: No; Rated Current: 15A; Working Voltage: 300V (AC); Manufacturer Part Number: 691313510004; Product Series: WR-TBL; ComponentLink1Description: Website Link; ComponentLink1URL: https://www.we-online.com; ComponentLink2Description: Datasheet Link; ComponentLink2URL: https://www.we-online.com/components/products/datasheet/691313510004; Mount: Through Hole; Operating Temperature Min: -40degC; Operating Temperature Max: 105degC; Packaging: Box; Application: Pluggable; Number of Pins: 4; Number of Rows: 1; Orientation: Horizontal; Lead Pitch: 5.08mm
footprint 691313510004
pins: 1, 2, 3, 4

## 691313510005
designator P?  (value not drawn)
WR-TBL Series 313 Close Horizontal PCB Header, THT, pitch 5.08mm, 05p; Manufacturer: Wurth Elektronik; Modularity: No; Rated Current: 15A; Working Voltage: 300V (AC); Manufacturer Part Number: 691313510005; Product Series: WR-TBL; ComponentLink1Description: Website Link; ComponentLink1URL: https://www.we-online.com; ComponentLink2Description: Datasheet Link; ComponentLink2URL: https://www.we-online.com/components/products/datasheet/691313510005; Mount: Through Hole; Operating Temperature Min: -40degC; Operating Temperature Max: 105degC; Packaging: Box; Application: Pluggable; Number of Pins: 5; Number of Rows: 1; Orientation: Horizontal; Lead Pitch: 5.08mm
footprint 691313510005
pins: 1, 2, 3, 4, 5

## 691313510006
designator P?  (value not drawn)
WR-TBL Series 313 Close Horizontal PCB Header, THT, pitch 5.08mm, 06p; Manufacturer: Wurth Elektronik; Modularity: No; Rated Current: 15A; Working Voltage: 300V (AC); Manufacturer Part Number: 691313510006; Product Series: WR-TBL; ComponentLink1Description: Website Link; ComponentLink1URL: https://www.we-online.com; ComponentLink2Description: Datasheet Link; ComponentLink2URL: https://www.we-online.com/components/products/datasheet/691313510006; Mount: Through Hole; Operating Temperature Min: -40degC; Operating Temperature Max: 105degC; Packaging: Box; Application: Pluggable; Number of Pins: 6; Number of Rows: 1; Orientation: Horizontal; Lead Pitch: 5.08mm
footprint 691313510006
pins: 1, 2, 3, 4, 5, 6

## 691313510007
designator P?  (value not drawn)
WR-TBL Series 313 Close Horizontal PCB Header, THT, pitch 5.08mm, 07p; Manufacturer: Wurth Elektronik; Modularity: No; Rated Current: 15A; Working Voltage: 300V (AC); Manufacturer Part Number: 691313510007; Product Series: WR-TBL; ComponentLink1Description: Website Link; ComponentLink1URL: https://www.we-online.com; ComponentLink2Description: Datasheet Link; ComponentLink2URL: https://www.we-online.com/components/products/datasheet/691313510007; Mount: Through Hole; Operating Temperature Min: -40degC; Operating Temperature Max: 105degC; Packaging: Box; Application: Pluggable; Number of Pins: 7; Number of Rows: 1; Orientation: Horizontal; Lead Pitch: 5.08mm
footprint 691313510007
pins: 1, 2, 3, 4, 5, 6, 7

## 691313510008
designator P?  (value not drawn)
WR-TBL Series 313 Close Horizontal PCB Header, THT, pitch 5.08mm, 08p; Manufacturer: Wurth Elektronik; Modularity: No; Rated Current: 15A; Working Voltage: 300V (AC); Manufacturer Part Number: 691313510008; Product Series: WR-TBL; ComponentLink1Description: Website Link; ComponentLink1URL: https://www.we-online.com; ComponentLink2Description: Datasheet Link; ComponentLink2URL: https://www.we-online.com/components/products/datasheet/691313510008; Mount: Through Hole; Operating Temperature Min: -40degC; Operating Temperature Max: 105degC; Packaging: Box; Application: Pluggable; Number of Pins: 8; Number of Rows: 1; Orientation: Horizontal; Lead Pitch: 5.08mm
footprint 691313510008
pins: 1, 2, 3, 4, 5, 6, 7, 8

## 691313510009
designator P?  (value not drawn)
WR-TBL Series 313 Close Horizontal PCB Header, THT, pitch 5.08mm, 09p; Manufacturer: Wurth Elektronik; Modularity: No; Rated Current: 15A; Working Voltage: 300V (AC); Manufacturer Part Number: 691313510009; Product Series: WR-TBL; ComponentLink1Description: Website Link; ComponentLink1URL: https://www.we-online.com; ComponentLink2Description: Datasheet Link; ComponentLink2URL: https://www.we-online.com/components/products/datasheet/691313510009; Mount: Through Hole; Operating Temperature Min: -40degC; Operating Temperature Max: 105degC; Packaging: Box; Application: Pluggable; Number of Pins: 9; Number of Rows: 1; Orientation: Horizontal; Lead Pitch: 5.08mm
footprint 691313510009
pins: 1, 2, 3, 4, 5, 6, 7, 8, 9

## 691313510010
designator P?  (value not drawn)
WR-TBL Series 313 Close Horizontal PCB Header, THT, pitch 5.08mm, 10p; Manufacturer: Wurth Elektronik; Modularity: No; Rated Current: 15A; Working Voltage: 300V (AC); Manufacturer Part Number: 691313510010; Product Series: WR-TBL; ComponentLink1Description: Website Link; ComponentLink1URL: https://www.we-online.com; ComponentLink2Description: Datasheet Link; ComponentLink2URL: https://www.we-online.com/components/products/datasheet/691313510010; Mount: Through Hole; Operating Temperature Min: -40degC; Operating Temperature Max: 105degC; Packaging: Box; Application: Pluggable; Number of Pins: 10; Number of Rows: 1; Orientation: Horizontal; Lead Pitch: 5.08mm
footprint 691313510010
pins: 1, 2, 3, 4, 5, 6, 7, 8, 9, 10

## 691313510011
designator P?  (value not drawn)
WR-TBL Series 313 Close Horizontal PCB Header, THT, pitch 5.08mm, 11p; Manufacturer: Wurth Elektronik; Modularity: No; Rated Current: 15A; Working Voltage: 300V (AC); Manufacturer Part Number: 691313510011; Product Series: WR-TBL; ComponentLink1Description: Website Link; ComponentLink1URL: https://www.we-online.com; ComponentLink2Description: Datasheet Link; ComponentLink2URL: https://www.we-online.com/components/products/datasheet/691313510011; Mount: Through Hole; Operating Temperature Min: -40degC; Operating Temperature Max: 105degC; Packaging: Box; Application: Pluggable; Number of Pins: 11; Number of Rows: 1; Orientation: Horizontal; Lead Pitch: 5.08mm
footprint 691313510011
pins: 1, 2, 3, 4, 5, 6, 7, 8, 9, 10, 11